# Altium footprint library FootPrintLib_1.PcbLib: 498 footprints (part 30 of 35)
Each footprint in its own frame and in the unit in brackets; x right, y up, seen from the top. Pads: shape width x height; smd on the part's side, far side on the other; paste and mask are expansions set on the pad; w line width, h text height; cw(c..) or ccw(c..) is an arc to the next point about the centre after c.
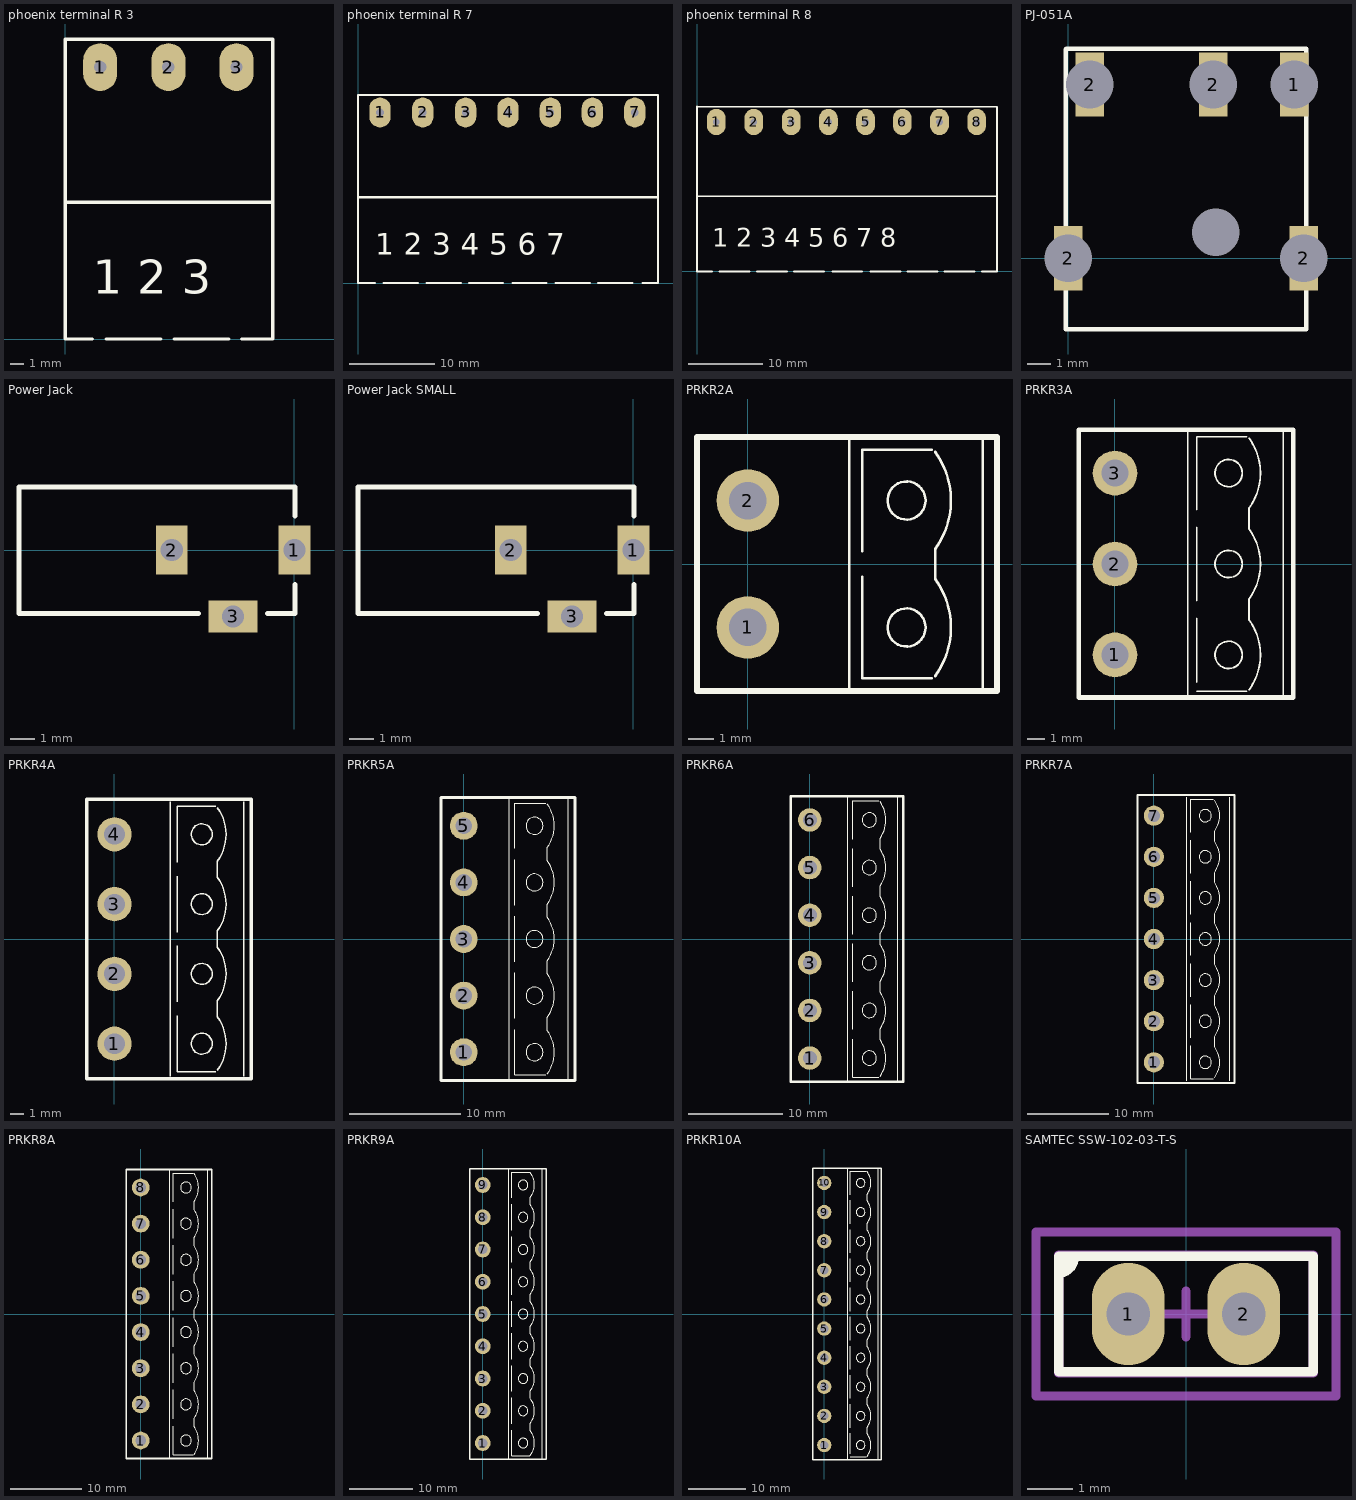
[diagram p29: the footprints below, top view; thin cyan lines are the x and y axes]

## phoenix terminal R 3 [mm] "3 Right terminals"
pads (3):
  oval 2.5x3.5 hole 0.9: 1(2.573,19.939) 2(7.573,19.939) 3(12.573,19.939)
Top Overlay:
  lines w0.254: 0,21.971 15.24,21.971 15.24,0 12.953,0 ; 0,22 0,0 2,0 ; 0.127,10.033 15.113,10.033 ; 3,0 7,0 ; 8,0 12,0
  text "1 2 3" at 2.032,3.302 h2.5

## phoenix terminal R 7 [mm] "7 Right terminals"
pads (7):
  oval 2.5x3.5 hole 0.9: 1(2.573,19.939) 2(7.573,19.939) 3(12.573,19.939) 4(17.526,19.939) 5(22.479,19.939) 6(27.385,19.939) 7(32.338,19.939)
Top Overlay:
  lines w0.254: 0,21.971 35.052,21.971 35.052,0 33.274,0 ; 0,22 0,0 2,0 ; 0.127,10.033 35.052,10.033 ; 3,0 7,0 ; 8,0 12,0 ; 12.953,0 16.953,0 ; 18.033,0 22.033,0 ; 23.113,0 27.113,0 ; 28.066,0 32.066,0
  text "1 2 3 4 5 6 7" at 2.032,3.302 h2.5

## phoenix terminal R 8 [mm] "8 Right terminals"
pads (8):
  oval 2.5x3.5 hole 0.9: 1(2.573,19.939) 2(7.573,19.939) 3(12.573,19.939) 4(17.526,19.939) 5(22.479,19.939) 6(27.385,19.939) 7(32.338,19.939) 8(37.291,19.939)
Top Overlay:
  lines w0.254: 0,21.971 40.005,21.971 40.005,0 37.973,0 ; 0,22 0,0 2,0 ; 0.127,10.033 40.005,10.033 ; 3,0 7,0 ; 8,0 12,0 ; 12.953,0 16.953,0 ; 18.033,0 22.033,0 ; 23.113,0 27.113,0 ; 28.066,0 32.066,0 ; 33.02,0 37.02,0
  text "1 2 3 4 5 6 7 8" at 2.032,3.302 h2.5

## PJ-051A [mm] "Power Jack"
pads (6):
  rect 0x0 hole 2 square: 0(6.2,1.1)
  rect 1.2x2.7 hole 2 square: 1(9.5,7.3) 2(0,0) 2(0.9,7.3) 2(6.1,7.3) 2(9.9,0)
Top Overlay:
  lines w0.2: -0.1,-2.975 -0.1,8.775 -0.075,8.8 10,8.8 10,-2.975 -0.1,-2.975
3D body "CUI_PJ-051A.sldprt": height 7.3, standoff -2.5, extent -0.1,-2.975 10,8.775

## Power Jack [mm] "Pin connections for Barrel Jack"
height 5.4
pads (3):
  rect 1.3x2 hole 0.9 square: 1(0,0) 2(-5,0)
  rect 2x1.3 hole 0.9 square: 3(-2.5,-2.7)
Top Overlay:
  lines w0.2: -3.9,-2.575 -11.225,-2.575 -11.225,2.575 0.025,2.575 0.025,1.4 ; -1.1,-2.575 0.025,-2.575 0.025,-1.4
3D body "pj-007.stp": height 7.4, standoff -3.2, extent -11.313,-2.683 0.137,2.667

## Power Jack SMALL [mm] "Pin connections for Barrel Jack"
height 5.4
pads (3):
  rect 1.3x2 hole 0.9 square: 1(0,0) 2(-5,0)
  rect 2x1.3 hole 0.9 square: 3(-2.5,-2.7)
Top Overlay:
  lines w0.2: -3.9,-2.575 -11.225,-2.575 -11.225,2.575 0.025,2.575 0.025,1.4 ; -1.1,-2.575 0.025,-2.575 0.025,-1.4
3D body "pj-007.stp": height 7.4, standoff -3.2, extent -11.313,-2.683 0.137,2.667

## PRKR2A [mm]
height 1.2
pads (2):
  round 2.5 hole 1.5: 1(0,-2.54) 2(0,2.54)
Top Overlay:
  circle w0.102: c6.35,-2.54 r0.762
  circle w0.102: c6.35,2.54 r0.762
  lines w0.102: 4.064,-5.08 4.064,5.08 ; 4.572,-0.508 4.572,-4.572 7.366,-4.572 ; 4.572,0.508 4.572,4.572 7.366,4.572 ; 7.496,-4.482 ccw(c4.826,-2.54) 7.496,-0.598 7.496,0.598 ccw(c4.826,2.54) 7.496,4.482 ; 9.398,-5.08 9.398,5.08
  lines w0.254: -2.032,-5.08 9.97,-5.08 9.97,5.08 -2.032,5.08 -2.032,-5.08
3D body "User Library-MSTB 2,5-2-G-5,08 1770711_mstb_2.5-2-g-5.08-la.STEP": height 8.67, standoff -3.43, extent -2.032,-5.08 9.97,5.08

## PRKR3A [mm]
pads (3):
  round 2.5 hole 1.5: 1(0,-5.08) 2(0,0) 3(0,5.08)
Top Overlay:
  circle w0.102: c6.35,-5.08 r0.762
  circle w0.102: c6.35,0 r0.762
  circle w0.102: c6.35,5.08 r0.762
  lines w0.102: 4.064,-7.46 4.064,7.5 ; 4.572,-7.112 7.366,-7.112 ; 4.572,-6.604 4.572,-3.048 ; 4.572,-2.032 4.572,2.032 ; 4.572,3.048 4.572,7.112 7.366,7.112 ; 7.496,-7.022 ccw(c4.826,-5.08) 7.496,-3.138 7.496,-1.942 ccw(c4.826,0) 7.496,1.942 7.496,3.138 ccw(c4.826,5.08) 7.496,7.022 ; 9.398,-7.46 9.398,7.5
  lines w0.254: -2.032,-7.46 -2.032,7.5 9.968,7.5 9.968,-7.46 -2.032,-7.46
3D body "User Library-MSTB 2,5-3-G 1754452_mstb_2.5-3-g.STEP": height 8.67, standoff -3.43, extent -2.032,-7.5 9.968,7.5

## PRKR4A [mm]
height 1.2
pads (4):
  round 2.5 hole 1.5: 1(0,-7.62) 2(0,-2.54) 3(0,2.54) 4(0,7.62)
Top Overlay:
  circle w0.102: c6.35,7.62 r0.762
  circle w0.102: c6.35,2.54 r0.762
  circle w0.102: c6.35,-2.54 r0.762
  circle w0.102: c6.35,-7.62 r0.762
  lines w0.102: 4.064,-10 4.064,10 ; 4.572,-5.588 4.572,-9.652 7.366,-9.652 ; 4.572,-4.572 4.572,-0.508 ; 4.572,0.508 4.572,4.572 ; 4.572,5.588 4.572,9.652 7.366,9.652 ; 7.496,-9.562 ccw(c4.826,-7.62) 7.496,-5.678 7.496,-4.482 ccw(c4.826,-2.54) 7.496,-0.598 7.496,0.598 ccw(c4.826,2.54) 7.496,4.482 7.496,5.678 ccw(c4.826,7.62) 7.496,9.562 ; 9.398,-10 9.398,10
  lines w0.254: -2.032,-10.16 -2.032,10.16 9.97,10.16 9.97,-10.16 -2.032,-10.16
3D body "User Library-MSTB 2,5-4-G-5,08 1759033_mstb_2.5-4-g-5.08.STEP": height 8.67, standoff -3.43, extent -2.032,-10.16 9.97,10.16

## PRKR5A [mm]
height 1.2
pads (5):
  round 2.5 hole 1.5: 1(0,-10.16) 2(0,-5.08) 3(0,0) 4(0,5.08) 5(0,10.16)
Top Overlay:
  circle w0.102: c6.35,5.08 r0.762
  circle w0.102: c6.35,0 r0.762
  circle w0.102: c6.35,-5.08 r0.762
  circle w0.102: c6.35,-10.16 r0.762
  circle w0.102: c6.35,10.16 r0.762
  lines w0.102: 4.064,-12.54 4.064,12.7 ; 4.572,-8.128 4.572,-12.192 7.366,-12.192 ; 4.572,-7.112 4.572,-3.048 ; 4.572,-2.032 4.572,2.032 ; 4.572,3.048 4.572,7.112 ; 4.572,8.128 4.572,12.192 7.366,12.192 ; 7.496,-12.102 ccw(c4.826,-10.16) 7.496,-8.218 7.496,-7.022 ccw(c4.826,-5.08) 7.496,-3.138 7.496,-1.942 ccw(c4.826,0) 7.496,1.942 7.496,3.138 ccw(c4.826,5.08) 7.496,7.022 7.496,8.218 ccw(c4.826,10.16) 7.496,12.102 ; 9.398,-12.54 9.398,12.7
  lines w0.254: -2.032,-12.7 -2.032,12.7 9.97,12.7 9.97,-12.7 -2.032,-12.7
3D body "User Library-MSTB 2,5-5-G-5,08 1759046_mstb_2.5-5-g-5.08.STEP": height 8.67, standoff -3.43, extent -2.032,-12.7 9.97,12.7

## PRKR6A [mm]
height 1.2
pads (6):
  round 2.5 hole 1.5: 1(0,-12.7) 2(0,-7.62) 3(0,-2.54) 4(0,2.54) 5(0,7.62) 6(0,12.7)
Top Overlay:
  circle w0.102: c6.35,12.7 r0.762
  circle w0.102: c6.35,-12.7 r0.762
  circle w0.102: c6.35,-7.62 r0.762
  circle w0.102: c6.35,-2.54 r0.762
  circle w0.102: c6.35,2.54 r0.762
  circle w0.102: c6.35,7.62 r0.762
  lines w0.102: 4.064,-15.24 4.064,15.24 ; 4.572,-10.668 4.572,-14.732 7.366,-14.732 ; 4.572,-9.652 4.572,-5.588 ; 4.572,-4.572 4.572,-0.508 ; 4.572,0.508 4.572,4.572 ; 4.572,5.588 4.572,9.652 ; 4.572,10.668 4.572,14.732 7.366,14.732 ; 7.496,-14.642 ccw(c4.826,-12.7) 7.496,-10.758 7.496,-9.562 ccw(c4.826,-7.62) 7.496,-5.678 7.496,-4.482 ccw(c4.826,-2.54) 7.496,-0.598 7.496,0.598 ccw(c4.826,2.54) 7.496,4.482 7.496,5.678 ccw(c4.826,7.62) 7.496,9.562 7.496,10.758 ccw(c4.826,12.7) 7.496,14.642 ; 9.398,-15.24 9.398,15.24
  lines w0.254: -2.032,-15.24 -2.032,15.24 9.97,15.24 9.97,-15.24 -2.032,-15.24
3D body "User Library-MSTB 2,5-6-G-5,08 1759059_mstb_2.5-6-g-5.08.STEP": height 8.67, standoff -3.43, extent -2.032,-15.24 9.97,15.24

## PRKR7A [mm]
height 1.2
pads (7):
  round 2.5 hole 1.5: 1(0,-15.24) 2(0,-10.16) 3(0,-5.08) 4(0,0) 5(0,5.08) 6(0,10.16) 7(0,15.24)
Top Overlay:
  circle w0.102: c6.35,-15.24 r0.762
  circle w0.102: c6.35,15.24 r0.762
  circle w0.102: c6.35,5.08 r0.762
  circle w0.102: c6.35,0 r0.762
  circle w0.102: c6.35,-5.08 r0.762
  circle w0.102: c6.35,-10.16 r0.762
  circle w0.102: c6.35,10.16 r0.762
  lines w0.102: 4.064,-17.5 4.064,17.5 ; 4.572,-13.208 4.572,-17.272 7.366,-17.272 ; 4.572,-12.192 4.572,-8.128 ; 4.572,-7.112 4.572,-3.048 ; 4.572,-2.032 4.572,2.032 ; 4.572,3.048 4.572,7.112 ; 4.572,8.128 4.572,12.192 ; 4.572,13.208 4.572,17.272 7.366,17.272 ; 7.496,-17.182 ccw(c4.826,-15.24) 7.496,-13.298 7.496,-12.102 ccw(c4.826,-10.16) 7.496,-8.218 7.496,-7.022 ccw(c4.826,-5.08) 7.496,-3.138 7.496,-1.942 ccw(c4.826,0) 7.496,1.942 7.496,3.138 ccw(c4.826,5.08) 7.496,7.022 7.496,8.218 ccw(c4.826,10.16) 7.496,12.102 7.496,13.298 ccw(c4.826,15.24) 7.496,17.182 ; 9.398,-17.5 9.398,17.5
  lines w0.254: -2.032,-17.78 -2.032,17.78 9.97,17.78 9.97,-17.78 -2.032,-17.78
3D body "User Library-MSTB 2,5-7-G-5,08 1759062_mstb_2.5-7-g-5.08.STEP": height 8.67, standoff -3.43, extent -2.032,-17.78 9.97,17.78

## PRKR8A [mm]
height 1.2
pads (8):
  round 2.5 hole 1.5: 1(0,-17.78) 2(0,-12.7) 3(0,-7.62) 4(0,-2.54) 5(0,2.54) 6(0,7.62) 7(0,12.7) 8(0,17.78)
Top Overlay:
  circle w0.102: c6.35,7.62 r0.762
  circle w0.102: c6.35,2.54 r0.762
  circle w0.102: c6.35,-2.54 r0.762
  circle w0.102: c6.35,-7.62 r0.762
  circle w0.102: c6.35,-12.7 r0.762
  circle w0.102: c6.35,12.7 r0.762
  circle w0.102: c6.35,17.78 r0.762
  circle w0.102: c6.35,-17.78 r0.762
  lines w0.102: 4.064,-20.32 4.064,20.32 ; 4.572,-15.748 4.572,-19.812 7.366,-19.812 ; 4.572,-14.732 4.572,-10.668 ; 4.572,-9.652 4.572,-5.588 ; 4.572,-4.572 4.572,-0.508 ; 4.572,0.508 4.572,4.572 ; 4.572,5.588 4.572,9.652 ; 4.572,10.668 4.572,14.732 ; 4.572,15.748 4.572,19.812 7.366,19.812 ; 7.496,-19.722 ccw(c4.826,-17.78) 7.496,-15.838 7.496,-14.642 ccw(c4.826,-12.7) 7.496,-10.758 7.496,-9.562 ccw(c4.826,-7.62) 7.496,-5.678 7.496,-4.482 ccw(c4.826,-2.54) 7.496,-0.598 7.496,0.598 ccw(c4.826,2.54) 7.496,4.482 7.496,5.678 ccw(c4.826,7.62) 7.496,9.562 7.496,10.758 ccw(c4.826,12.7) 7.496,14.642 7.496,15.838 ccw(c4.826,17.78) 7.496,19.722 ; 9.398,-20.32 9.398,20.32
  lines w0.254: -2.032,-20.32 9.97,-20.32 9.97,20.32 -2.032,20.32 -2.032,-20.32
3D body "User Library-MSTB 2,5-8-G-5,08 1759075_mstb_2.5-8-g-5.08.STEP": height 8.67, standoff -3.43, extent -2.032,-20.32 9.97,20.32

## PRKR9A [mm]
height 1.2
pads (9):
  round 2.5 hole 1.5: 1(0,-20.32) 2(0,-15.24) 3(0,-10.16) 4(0,-5.08) 5(0,0) 6(0,5.08) 7(0,10.16) 8(0,15.24) 9(0,20.32)
Top Overlay:
  circle w0.102: c6.35,10.16 r0.762
  circle w0.102: c6.35,-10.16 r0.762
  circle w0.102: c6.35,-5.08 r0.762
  circle w0.102: c6.35,0 r0.762
  circle w0.102: c6.35,5.08 r0.762
  circle w0.102: c6.35,15.24 r0.762
  circle w0.102: c6.35,-15.24 r0.762
  circle w0.102: c6.35,-20.32 r0.762
  circle w0.102: c6.35,20.32 r0.762
  lines w0.102: 4.064,-22.86 4.064,22.86 ; 4.572,-18.288 4.572,-22.352 7.366,-22.352 ; 4.572,-17.272 4.572,-13.208 ; 4.572,-12.192 4.572,-8.128 ; 4.572,-7.112 4.572,-3.048 ; 4.572,-2.032 4.572,2.032 ; 4.572,3.048 4.572,7.112 ; 4.572,8.128 4.572,12.192 ; 4.572,13.208 4.572,17.272 ; 4.572,18.288 4.572,22.352 7.366,22.352 ; 7.496,-22.262 ccw(c4.826,-20.32) 7.496,-18.378 7.496,-17.182 ccw(c4.826,-15.24) 7.496,-13.298 7.496,-12.102 ccw(c4.826,-10.16) 7.496,-8.218 7.496,-7.022 ccw(c4.826,-5.08) 7.496,-3.138 7.496,-1.942 ccw(c4.826,0) 7.496,1.942 7.496,3.138 ccw(c4.826,5.08) 7.496,7.022 7.496,8.218 ccw(c4.826,10.16) 7.496,12.102 7.496,13.298 ccw(c4.826,15.24) 7.496,17.182 7.496,18.378 ccw(c4.826,20.32) 7.496,22.262 ; 9.398,-22.86 9.398,22.86
  lines w0.254: -2.032,-22.86 9.97,-22.86 9.97,22.86 -2.032,22.86 -2.032,-22.86
3D body "User Library-MSTB 2,5-9-G-5,08 1759088_mstb_2.5-9-g-5.08.STEP": height 8.67, standoff -3.43, extent -2.032,-22.86 9.97,22.86

## PRKR10A [mm]
pads (10):
  round 2.5 hole 1.5: 1(0,-22.86) 2(0,-17.78) 3(0,-12.7) 4(0,-7.62) 5(0,-2.54) 6(0,2.54) 7(0,7.62) 8(0,12.7) 9(0,17.78) 10(0,22.86)
Top Overlay:
  circle w0.102: c6.35,7.62 r0.762
  circle w0.102: c6.35,2.54 r0.762
  circle w0.102: c6.35,-2.54 r0.762
  circle w0.102: c6.35,-7.62 r0.762
  circle w0.102: c6.35,12.7 r0.762
  circle w0.102: c6.35,17.78 r0.762
  circle w0.102: c6.35,-12.7 r0.762
  circle w0.102: c6.35,-17.78 r0.762
  circle w0.102: c6.35,22.86 r0.762
  circle w0.102: c6.35,-22.86 r0.762
  lines w0.102: 4.064,-25.4 4.064,25.4 ; 4.572,-24.892 7.366,-24.892 ; 4.572,-24.384 4.572,-20.828 ; 4.572,-19.812 4.572,-15.748 ; 4.572,-14.732 4.572,-10.668 ; 4.572,-9.652 4.572,-5.588 ; 4.572,-4.572 4.572,-1.016 ; 4.572,-4.064 4.572,-0.508 ; 4.572,0.508 4.572,4.064 ; 4.572,1.016 4.572,4.572 ; 4.572,5.588 4.572,9.652 ; 4.572,10.668 4.572,14.732 ; 4.572,15.748 4.572,19.812 ; 4.572,20.828 4.572,24.892 7.366,24.892 ; 7.496,-24.802 ccw(c4.826,-22.86) 7.496,-20.918 7.496,-19.722 ccw(c4.826,-17.78) 7.496,-15.838 7.496,-14.642 ccw(c4.826,-12.7) 7.496,-10.758 7.496,-9.562 ccw(c4.826,-7.62) 7.496,-5.678 7.496,-4.482 ccw(c4.826,-2.54) 7.496,-0.598 7.496,0.598 ccw(c4.826,2.54) 7.496,4.482 7.496,5.678 ccw(c4.826,7.62) 7.496,9.562 7.496,10.758 ccw(c4.826,12.7) 7.496,14.642 7.496,15.838 ccw(c4.826,17.78) 7.496,19.722 7.496,20.918 ccw(c4.826,22.86) 7.496,24.802 ; 9.398,-25.4 9.398,25.4
  lines w0.254: 9.968,-25.4 9.968,25.4 ; 9.97,-25.4 -2.032,-25.4 -2.032,25.4 9.97,25.4
3D body "User Library-MSTB 2,5-10-G-5,08 1759091_mstb_2.5-10-g-5.08.STEP": height 8.67, standoff -3.43, extent -2.032,-25.4 9.97,25.4

## SAMTEC SSW-102-03-T-S [mm]
height 8.51
pads (2):
  oval 1.6x2.25 hole 0.95: 1(-1.27,0) 2(1.27,0)
Top Overlay:
  region: -2.8,1.27 -2.46,1.27 -2.46,1.1 -2.66,0.9 -2.8,0.9
  lines w0.2: -2.8,0.9 ccw(c-2.8,1.24) -2.46,1.24 -2.46,1.27 ; -2.8,-1.27 2.8,-1.27 2.8,1.27 -2.8,1.27 -2.8,-1.27
Mechanical 13:
  lines w0.2: -2.8,-1.3 -2.8,1.3 2.8,1.3 2.8,-1.3 -2.8,-1.3
Mechanical 15:
  lines w0.2: -0.5,0 0.5,0 ; 0,-0.5 0,0.5 ; -3.3,-1.8 3.3,-1.8 3.3,1.8 -3.3,1.8 -3.3,-1.8
3D body "Samtec-SSW-102-03-T-S.STEP": height 8.51, standoff -10.01, extent -2.794,-1.206 2.794,1.207